# Altium footprint library FootPrintLib_0.PcbLib: 266 footprints (part 11 of 17)
Each footprint in its own frame and in the unit in brackets; x right, y up, seen from the top. Pads: shape width x height; smd on the part's side, far side on the other; paste and mask are expansions set on the pad; w line width, h text height; cw(c..) or ccw(c..) is an arc to the next point about the centre after c.
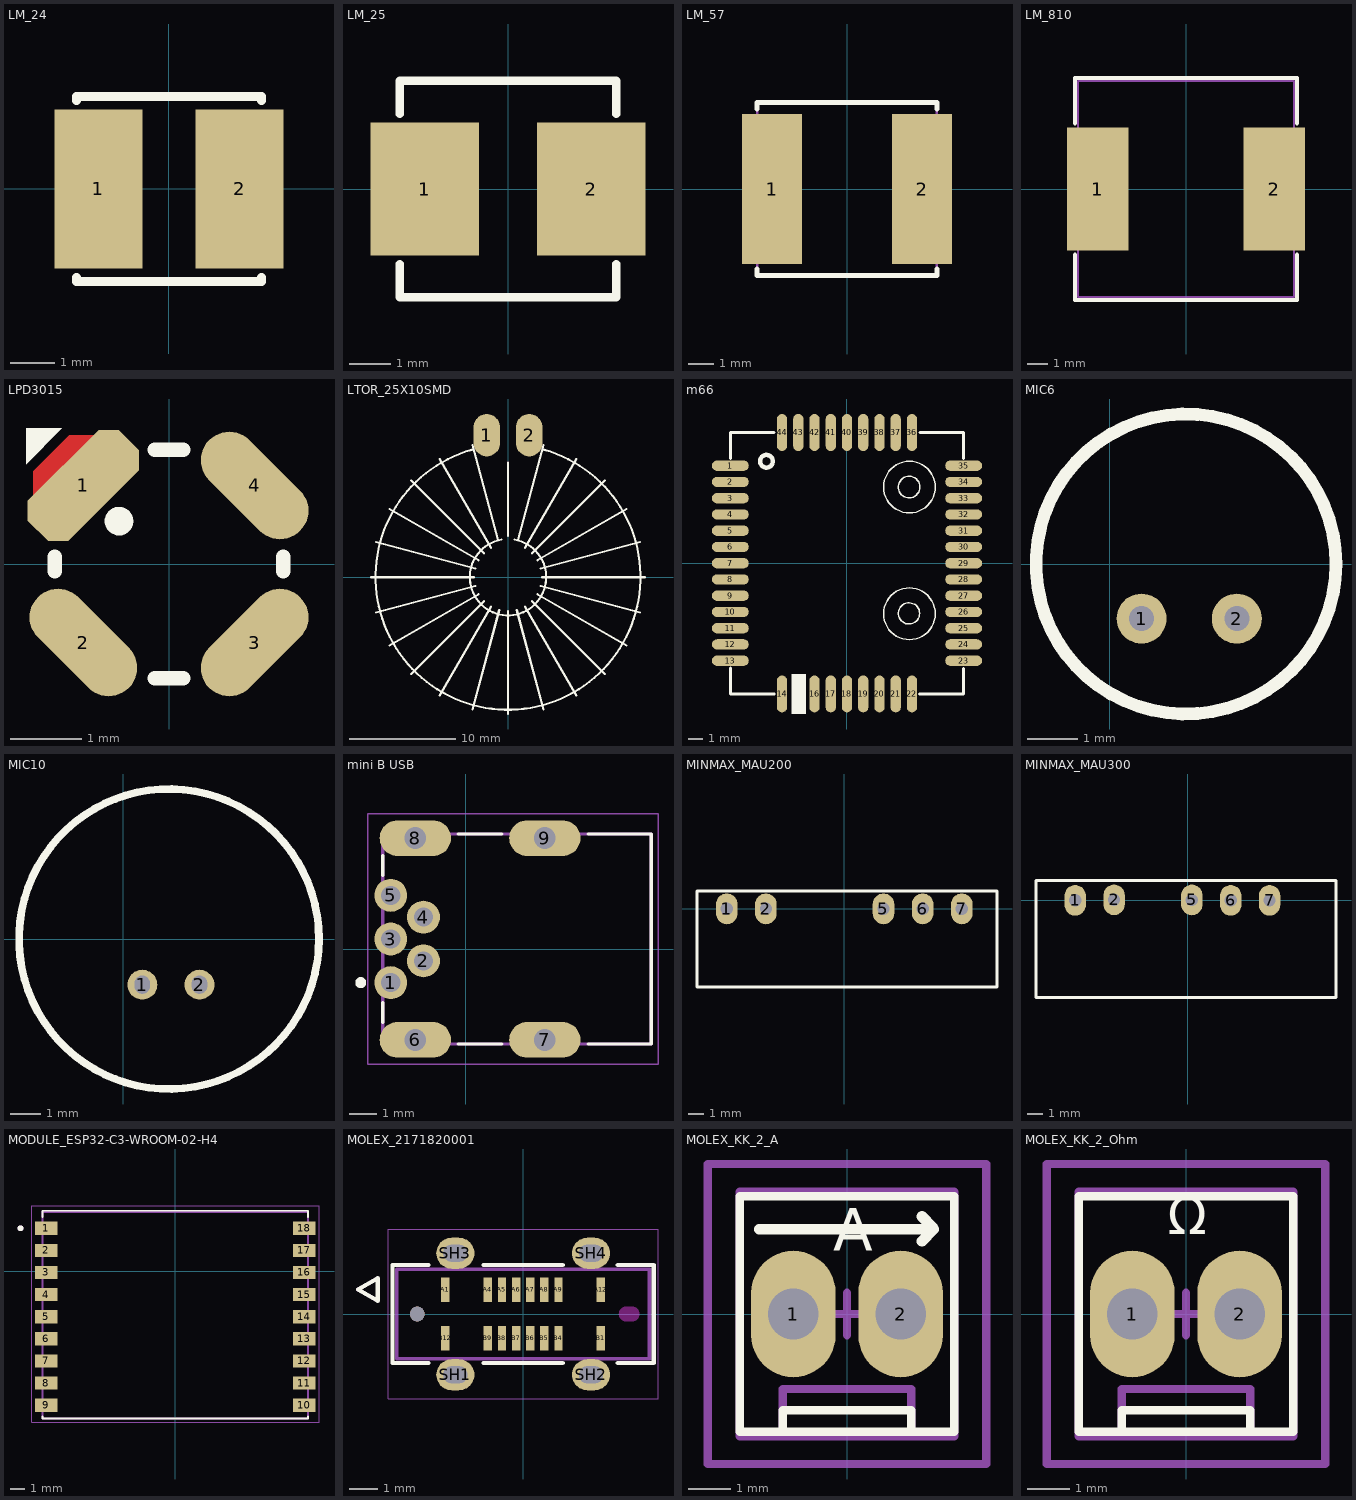
[diagram p10: the footprints below, top view; thin cyan lines are the x and y axes]

## LM_24 [mm] "INDUCTOR, multi size, from 2x2 to 4x4mm"
height 2.5
pads (2):
  rect 2x3.6 smd: 1(-1.6,0) 2(1.6,0)
Top Overlay:
  lines w0.2: -2.1,-2 -2.1,-2.1 2.1,-2.1 2.1,-2 ; -2.1,2 -2.1,2.1 2.1,2.1 2.1,2
3D body: height 3, standoff 0, extent -2,-2 2,2

## LM_25 [mm] "INDUCTOR, multi size, FROM 2X2 TO 5X5mm"
pads (2):
  rect 2.6x3.2 smd: 1(-2,0) 2(2,0)
Top Overlay:
  lines w0.2: -2.6,-1.8 -2.6,-2.6 2.6,-2.6 2.6,-1.8 ; -2.6,1.8 -2.6,2.6 2.6,2.6 2.6,1.8
3D body: height 3, standoff 0, extent -2.5,-2.5 2.5,2.5

## LM_57 [mm] "INDUCTOR, multi size, from 5x5 to 7x7"
height 4.5
pads (2):
  rect 2.4x6 smd: 1(-3,0) 2(3,0)
Top Overlay:
  lines w0.2: -3.6,-3.2 -3.6,-3.45 3.6,-3.45 3.6,-3.2 ; -3.6,3.2 -3.6,3.45 3.6,3.45 3.6,3.2
Mechanical 13:
  lines w0.1: -3.6,-3.45 -3.6,3.45 3.6,3.45 3.6,-3.45 -3.6,-3.45
3D body "User Library-FP3-Cooper.step": height 3, standoff 0, extent -3.625,-3.35 3.625,3.35

## LM_810 [mm] "INDUCTOR, multi size, FROM 8X8 TO 10X10"
height 4
pads (2):
  rect 3x6 smd: 1(-4.3,0) 2(4.3,0)
Top Overlay:
  lines w0.2: -5.4,-3.2 -5.4,-5.4 5.4,-5.4 5.4,-3.2 ; -5.4,3.2 -5.4,5.4 5.4,5.4 5.4,3.2
Mechanical 13:
  lines w0.1: -5.25,-5.25 5.25,-5.25 5.25,5.25 -5.25,5.25 -5.25,-5.25
3D body "User Library-10x10 SMT Power Inductor.step": height 4.8, standoff 0, extent -5.2,-5.2 5.2,5.2

## LPD3015 [mm] "INDUCTOR, coupled, 3X3X1.5mm"
height 1.4
pads (4):
  oct 0.8x1.8 smd rot 135: 1(-1.2,1.1)
  oval 0.8x1.8 smd rot 45: 2(-1.2,-1.1) 4(1.2,1.1)
  oval 0.8x1.8 smd rot 135: 3(1.2,-1.1)
Top Layer:
  region: -0.9,1.8 -1.4,1.8 -1.9,1.3 -1.9,0.8
Top Overlay:
  circle w0.2: c-0.7,0.6 r0.1
  region: -2,1.4 -2,1.9 -1.5,1.9
  lines w0.2: -1.6,-0.1 -1.6,0.1 ; -0.2,-1.6 0.2,-1.6 ; -0.2,1.6 0.2,1.6 ; 1.6,-0.1 1.6,0.1
3D body "Coilcraft-LPD3015.step": height 1.5, standoff 0, extent -1.54,-1.54 1.54,1.54

## LTOR_25X10SMD [mm] "INDUCTOR, TORIOD, 25.0X10.0mm BENDED"
pads (2):
  oval 2.5x4 smd: 1(-2,13.4) 2(2,13.4)
Top Overlay:
  lines w0.2: -12.9,0 -3.2,0 ; -12.46,-3.339 -3.091,-0.828 ; -12.46,3.339 -3.091,0.828 ; -11.172,-6.45 -2.771,-1.6 ; -11.172,6.45 -2.771,1.6 ; -9.122,-9.122 -2.263,-2.263 ; -9.122,9.122 -2.263,2.263 ; -6.45,-11.172 -1.6,-2.771 ; -6.45,11.172 -1.6,2.771 ; -3.408,12.027 ccw(c0,0) 3.408,12.027 ; -3.339,-12.46 -0.828,-3.091 ; -3.339,12.46 -0.942,3.516 ; -0.625,3.545 ccw(c0,0) 0.625,3.545 ; 0,-12.9 0,-3.2 ; 0,3.9 0,10.8 ; 0.828,-3.091 3.339,-12.46 ; 0.942,3.516 3.339,12.46 ; 1.6,-2.771 6.45,-11.172 ; 1.6,2.771 6.45,11.172 ; 2.263,-2.263 9.122,-9.122 ; 2.263,2.263 9.122,9.122 ; 2.771,-1.6 11.172,-6.45 ; 2.771,1.6 11.172,6.45 ; 3.091,-0.828 12.46,-3.339 ; 3.091,0.828 12.46,3.339 ; 3.2,0 12.9,0
3D body "User Library-5701-RC.STEP": height 11.26, standoff -0.06, extent -11.21,-11.235 11.21,23.8

## m66 [mm]
pads (43):
  oval 2.5x0.7 smd: 1(-7.9,6.6) 2(-7.9,5.5) 3(-7.9,4.4) 4(-7.9,3.3) 5(-7.9,2.2) 6(-7.9,1.1) 7(-7.9,0) 8(-7.9,-1.1) 9(-7.9,-2.2) 10(-7.9,-3.3) 11(-7.9,-4.4) 12(-7.9,-5.5) 13(-7.9,-6.6) 23(7.9,-6.6) 24(7.9,-5.5) 25(7.9,-4.4) 26(7.9,-3.3) 27(7.9,-2.2) 28(7.9,-1.1) 29(7.9,0) 30(7.9,1.1) 31(7.9,2.2) 32(7.9,3.3) 33(7.9,4.4) 34(7.9,5.5) 35(7.9,6.6)
  oval 0.7x2.5 smd: 14(-4.4,-8.85) 16(-2.2,-8.85) 17(-1.1,-8.85) 18(0,-8.85) 19(1.1,-8.85) 20(2.2,-8.85) 21(3.3,-8.85) 22(4.4,-8.85) 36(4.4,8.85) 37(3.3,8.85) 38(2.2,8.85) 39(1.1,8.85) 40(0,8.85) 41(-1.1,8.85) 42(-2.2,8.85) 43(-3.3,8.85) 44(-4.4,8.85)
Top Overlay:
  circle w0.3: c-5.45,6.9 r0.43
  circle w0.1: c4.225,5.15 r1.75
  circle w0.1: c4.225,-3.425 r1.75
  circle w0.1: c4.2,5.15 r0.735
  circle w0.1: c4.2,-3.4 r0.716
  rectangle: -3.759,-10.211 -2.769,-7.493
  lines w0.2: -7.9,-7.1 -7.9,-8.85 -4.925,-8.85 ; -7.9,7.075 -7.9,8.85 -4.95,8.85 ; 4.9,-8.85 7.9,-8.85 7.9,-7.125 ; 4.95,8.85 7.9,8.85 7.9,7.1
3D body "step_temp.STEP": height 2.5, standoff 0, extent -7.887,-8.827 7.913,8.873

## MIC6 [mm]
pads (2):
  round 1 hole 0.5: 1(0.635,-1.092) 2(2.54,-1.092)
Top Overlay:
  circle w0.254: c1.524,0 r3
3D body "User Library-6022microphone.step": height 2.26, standoff -2.8, extent -1.428,-3.023 4.572,2.977

## MIC10 [mm]
pads (2):
  round 1 hole 0.508 slot 0.6 at 90 deg: 1(0.635,-1.524) 2(2.54,-1.524)
Top Overlay:
  circle w0.254: c1.524,0 r5
3D body "User Library-Panasonic_WM55A103.step": height 5.43, standoff 0.03, extent -3.35,-4.696 6.35,5.004

## mini B USB [mm]
pads (9):
  round 1.208 hole 0.7: 1(-2.754,-1.219) 2(-1.554,-0.419) 3(-2.754,0.381) 4(-1.554,1.181) 5(-2.754,1.981)
  oval 2.616x1.308 hole 0.8 square: 6(-1.854,-3.319) 7(2.896,-3.319) 8(-1.854,4.081) 9(2.896,4.081)
Top Overlay:
  circle w0.2: c-3.854,-1.219 r0.1
  lines w0.127: -3.054,-2.669 -3.054,-1.959 ; -3.054,2.711 -3.054,3.441 ; -0.284,-3.469 1.326,-3.469 ; -0.284,4.231 1.326,4.231 ; 4.486,-3.469 6.796,-3.469 6.796,4.231 4.486,4.231
Mechanical 13:
  lines w0.127: -3.054,-3.469 -3.054,4.231 6.796,4.231 6.796,-3.469 -3.054,-3.469
Mechanical 15:
  lines w0.05: -3.604,-4.219 -3.604,4.981 7.046,4.981 7.046,-4.219 -3.604,-4.219
3D body "5877.STEP": height 3.95, standoff -1.8, extent -3.124,-3.469 5.876,4.231

## MINMAX_MAU200 [mm] "DC-DC Module, MAU200"
pads (5):
  oval 1.4x2 hole 0.8: 1(-7.62,0) 2(-5.08,0) 5(2.54,0) 6(5.08,0) 7(7.62,0)
Top Overlay:
  lines w0.2: -9.55,-5.055 9.9,-5.055 9.9,1.143 -9.55,1.143 -9.55,-5.055
3D body "User Library-MAU.step": height 9.7, standoff -3.7, extent -9.521,-5.03 9.979,1.17

## MINMAX_MAU300 [mm] "DC-DC Module, MAU200"
pads (5):
  oval 1.4x2 hole 0.8: 1(-7.341,0) 2(-4.797,0.035) 5(0.279,0.025) 6(2.819,0) 7(5.359,0)
Top Overlay:
  lines w0.2: -9.9,1.271 -9.9,-6.35 9.697,-6.35 9.697,1.3 -9.9,1.3
3D body "User Library-MAU302.step": height 9.7, standoff -3.5, extent -9.881,-6.365 9.619,1.235

## MODULE_ESP32-C3-WROOM-02-H4 [mm]
pads (18):
  rect 1.5x0.9 smd: 1(-8.75,2.9) 2(-8.75,1.4) 3(-8.75,-0.1) 4(-8.75,-1.6) 5(-8.75,-3.1) 6(-8.75,-4.6) 7(-8.75,-6.1) 8(-8.75,-7.6) 9(-8.75,-9.1) 10(8.75,-9.1) 11(8.75,-7.6) 12(8.75,-6.1) 13(8.75,-4.6) 14(8.75,-3.1) 15(8.75,-1.6) 16(8.75,-0.1) 17(8.75,1.4) 18(8.75,2.9)
Top Overlay:
  circle w0.2: c-10.5,2.9 r0.1
  lines w0.127: -9,-9.87 -9,-10 9,-10 9,-9.87 ; -9,3.67 -9,4.089 9,4.089 9,3.67
Mechanical 13:
  circle w0.2: c-10.5,2.9 r0.1
  lines w0.127: -9,4 9,4 ; -9,4 -9,-10 9,-10 9,4 ; -9,4 -9,4.039 9,4.039 9,4
Mechanical 15:
  lines w0.05: -9.75,-10.25 9.75,-10.25 9.75,4.42 -9.75,4.42 -9.75,-10.25
3D body "ESP32-C3-WROOM-02U-N4.step": height 3.31, standoff 0.1, extent -8.924,-10.185 9.076,4.115

## MOLEX_2171820001 [mm]
height 6.4
pads (21):
  rect 0.298x0.87 smd mask+0.064: A1(-2.75,0.865) A4(-1.25,0.865) A5(-0.75,0.865) A6(-0.25,0.865) A7(0.25,0.865) A8(0.75,0.865) A9(1.25,0.865) A12(2.75,0.865) B1(2.75,-0.865) B4(1.25,-0.865) B5(0.75,-0.865) B6(0.25,-0.865) B7(-0.25,-0.865) B8(-0.75,-0.865) B9(-1.25,-0.865) B12(-2.75,-0.865)
  oval 1.35x1.1 hole 0.6 slot 0.85 at 0 deg mask+0.064: SH1(-2.4,-2.15) SH2(2.4,-2.15) SH3(-2.4,2.15) SH4(2.4,2.15)
  round 0.52 hole 0.52 unplated mask+0.064: ""(-3.75,0)
Top Overlay:
  lines w0.15: -3.345,-1.73 -4.62,-1.73 -4.62,1.73 -3.345,1.73 ; -1.4,-1.73 1.4,-1.73 ; -1.4,1.73 1.4,1.73 ; 3.345,-1.73 4.62,-1.73 4.62,1.73 3.345,1.73 ; -5.843,0.867 -5.143,1.267 -5.143,0.467 -5.843,0.867
Top Solder:
  circle w0.323: c-3.75,0 r0.162
  region: 3.867,0.323 3.884,0.322 3.901,0.32 3.917,0.316 3.934,0.312 3.95,0.308 3.966,0.302 3.982,0.296 3.997,0.288 4.012,0.28 4.026,0.271 4.04,0.262 4.054,0.251 4.066,0.24 4.079,0.229 4.09,0.216 4.101,0.204 4.112,0.19 4.121,0.176 4.13,0.162 4.138,0.147 4.146,0.132 4.152,0.116 4.158,0.1 4.162,0.084 4.166,0.067 4.17,0.051 4.172,0.034 4.173,0.017 4.173,0 4.173,-0.017 4.172,-0.034 4.17,-0.051 4.166,-0.067 4.162,-0.084 4.158,-0.1 4.152,-0.116 4.146,-0.132 4.138,-0.147 4.13,-0.162 4.121,-0.176 4.112,-0.19 4.101,-0.204 4.09,-0.216 4.079,-0.229 4.066,-0.24 4.054,-0.251 4.04,-0.262 4.026,-0.271 4.012,-0.28 3.997,-0.288 3.982,-0.296 3.966,-0.302 3.95,-0.308 3.934,-0.312 3.917,-0.316 3.901,-0.32 3.884,-0.322 3.867,-0.323 3.85,-0.324 3.65,-0.324 3.633,-0.323 3.616,-0.322 3.599,-0.32 3.583,-0.316 3.566,-0.312 3.55,-0.308 3.534,-0.302 3.518,-0.296 3.503,-0.288 3.488,-0.28 3.474,-0.271 3.46,-0.262 3.446,-0.251 3.434,-0.24 3.421,-0.229 3.41,-0.216 3.399,-0.204 3.388,-0.19 3.379,-0.176 3.37,-0.162 3.362,-0.147 3.354,-0.132 3.348,-0.116 3.342,-0.1 3.338,-0.084 3.334,-0.067 3.33,-0.051 3.328,-0.034 3.327,-0.017 3.326,0 3.327,0.017 3.328,0.034 3.33,0.051 3.334,0.067 3.338,0.084 3.342,0.1 3.348,0.116 3.354,0.132 3.362,0.147 3.37,0.162 3.379,0.176 3.388,0.19 3.399,0.204 3.41,0.216 3.421,0.229 3.434,0.24 3.446,0.251 3.46,0.262 3.474,0.271 3.488,0.28 3.503,0.288 3.518,0.296 3.534,0.302 3.55,0.308 3.566,0.312 3.583,0.316 3.599,0.32 3.616,0.322 3.633,0.323 3.65,0.324 3.65,0.323 3.85,0.324
Bottom Solder:
  region: 3.867,0.323 3.884,0.322 3.901,0.32 3.917,0.316 3.934,0.312 3.95,0.308 3.966,0.302 3.982,0.296 3.997,0.288 4.012,0.28 4.026,0.271 4.04,0.262 4.054,0.251 4.066,0.24 4.079,0.229 4.09,0.216 4.101,0.204 4.112,0.19 4.121,0.176 4.13,0.162 4.138,0.147 4.146,0.132 4.152,0.116 4.158,0.1 4.162,0.084 4.166,0.067 4.17,0.051 4.172,0.034 4.173,0.017 4.173,0 4.173,-0.017 4.172,-0.034 4.17,-0.051 4.166,-0.067 4.162,-0.084 4.158,-0.1 4.152,-0.116 4.146,-0.132 4.138,-0.147 4.13,-0.162 4.121,-0.176 4.112,-0.19 4.101,-0.204 4.09,-0.216 4.079,-0.229 4.066,-0.24 4.054,-0.251 4.04,-0.262 4.026,-0.271 4.012,-0.28 3.997,-0.288 3.982,-0.296 3.966,-0.302 3.95,-0.308 3.934,-0.312 3.917,-0.316 3.901,-0.32 3.884,-0.322 3.867,-0.323 3.85,-0.324 3.65,-0.324 3.633,-0.323 3.616,-0.322 3.599,-0.32 3.583,-0.316 3.566,-0.312 3.55,-0.308 3.534,-0.302 3.518,-0.296 3.503,-0.288 3.488,-0.28 3.474,-0.271 3.46,-0.262 3.446,-0.251 3.434,-0.24 3.421,-0.229 3.41,-0.216 3.399,-0.204 3.388,-0.19 3.379,-0.176 3.37,-0.162 3.362,-0.147 3.354,-0.132 3.348,-0.116 3.342,-0.1 3.338,-0.084 3.334,-0.067 3.33,-0.051 3.328,-0.034 3.327,-0.017 3.326,0 3.327,0.017 3.328,0.034 3.33,0.051 3.334,0.067 3.338,0.084 3.342,0.1 3.348,0.116 3.354,0.132 3.362,0.147 3.37,0.162 3.379,0.176 3.388,0.19 3.399,0.204 3.41,0.216 3.421,0.229 3.434,0.24 3.446,0.251 3.46,0.262 3.474,0.271 3.488,0.28 3.503,0.288 3.518,0.296 3.534,0.302 3.55,0.308 3.566,0.312 3.583,0.316 3.599,0.32 3.616,0.322 3.633,0.323 3.65,0.324 3.65,0.323 3.85,0.324
Keep-Out Layer:
  board cut-out: 3.85,-0.26 3.65,-0.26 3.636,-0.26 3.623,-0.259 3.609,-0.257 3.596,-0.254 3.583,-0.251 3.57,-0.247 3.557,-0.243 3.544,-0.238 3.532,-0.232 3.52,-0.225 3.508,-0.218 3.497,-0.21 3.486,-0.202 3.476,-0.193 3.466,-0.184 3.457,-0.174 3.448,-0.164 3.44,-0.153 3.432,-0.142 3.425,-0.13 3.418,-0.118 3.412,-0.106 3.407,-0.093 3.403,-0.08 3.399,-0.067 3.396,-0.054 3.393,-0.041 3.391,-0.027 3.39,-0.014 3.39,0 3.39,0.014 3.391,0.027 3.393,0.041 3.396,0.054 3.399,0.067 3.403,0.08 3.407,0.093 3.412,0.106 3.418,0.118 3.425,0.13 3.432,0.142 3.44,0.153 3.448,0.164 3.457,0.174 3.466,0.184 3.476,0.193 3.486,0.202 3.497,0.21 3.508,0.218 3.52,0.225 3.532,0.232 3.544,0.238 3.557,0.243 3.57,0.247 3.583,0.251 3.596,0.254 3.609,0.257 3.623,0.259 3.636,0.26 3.65,0.26 3.85,0.26 3.864,0.26 3.877,0.259 3.891,0.257 3.904,0.254 3.917,0.251 3.93,0.247 3.943,0.243 3.956,0.238 3.968,0.232 3.98,0.225 3.992,0.218 4.003,0.21 4.014,0.202 4.024,0.193 4.034,0.184 4.043,0.174 4.052,0.164 4.06,0.153 4.068,0.142 4.075,0.13 4.082,0.118 4.088,0.106 4.093,0.093 4.097,0.08 4.101,0.067 4.104,0.054 4.107,0.041 4.109,0.027 4.11,0.014 4.11,0 4.11,-0.014 4.109,-0.027 4.107,-0.041 4.104,-0.054 4.101,-0.067 4.097,-0.08 4.093,-0.093 4.088,-0.106 4.082,-0.118 4.075,-0.13 4.068,-0.142 4.06,-0.153 4.052,-0.164 4.043,-0.174 4.034,-0.184 4.024,-0.193 4.014,-0.202 4.003,-0.21 3.992,-0.218 3.98,-0.225 3.968,-0.232 3.956,-0.238 3.943,-0.243 3.93,-0.247 3.917,-0.251 3.904,-0.254 3.891,-0.257 3.877,-0.259 3.864,-0.26
Mechanical 2:
  text "'.Designator'" at -0.536,0 h0.7
Mechanical 13:
  lines w0.13: -5.843,0.867 -5.143,1.267 -5.143,0.467 -5.843,0.867 ; -4.47,-1.58 -4.47,1.58 4.47,1.58 4.47,-1.58 -4.47,-1.58
Mechanical 15:
  lines w0.01: -4.77,-3 -4.77,3 4.77,3 4.77,-3 -4.77,-3
3D body "2171820001.stp": height 6.37, standoff -0.97, extent -4.47,-2.3 4.47,2.3

## MOLEX_KK_2_A [mm]
height 11.6
pads (2):
  oval 2x3 hole 1.2: 1(-1.27,0) 2(1.27,0)
Top Overlay:
  lines w0.2: -1.524,-2.794 -1.524,-2.286 1.524,-2.286 1.524,-2.794 ; -2.54,-2.794 -2.54,2.794 2.54,2.794 2.54,-2.794 -2.54,-2.794
  lines w0.254: -2.083,2.007 2.032,2.007 ; 1.778,1.727 2.057,2.007 ; 1.778,2.311 2.032,2.057
  text "A" at -0.33,1.499 h1
Mechanical 13:
  lines w0.2: -1.524,-2.9 -1.524,-1.778 1.524,-1.778 1.524,-2.9 ; -2.54,-2.9 -2.54,2.9 2.54,2.9 2.54,-2.9 -2.54,-2.9
Mechanical 15:
  lines w0.2: -0.508,0 0.508,0 ; 0,-0.508 0,0.508 ; -3.302,-3.556 -3.302,3.556 3.302,3.556 3.302,-1.016 3.302,-3.556 -1.016,-3.556 -3.302,-3.556
3D body "MOLEX KK 022272021.STEP": height 11.7, standoff -3.56, extent -2.54,-2.9 2.54,2.9

## MOLEX_KK_2_Ohm [mm]
height 11.6
pads (2):
  oval 2x3 hole 1.2: 1(-1.27,0) 2(1.27,0)
Top Overlay:
  lines w0.2: -1.524,-2.794 -1.524,-2.286 1.524,-2.286 1.524,-2.794 ; -2.54,-2.794 -2.54,2.794 2.54,2.794 2.54,-2.794 -2.54,-2.794
  text "Ω" at -0.432,1.592 h1.52
Mechanical 13:
  lines w0.2: -1.524,-2.9 -1.524,-1.778 1.524,-1.778 1.524,-2.9 ; -2.54,-2.9 -2.54,2.9 2.54,2.9 2.54,-2.9 -2.54,-2.9
Mechanical 15:
  lines w0.2: -0.508,0 0.508,0 ; 0,-0.508 0,0.508 ; -3.302,-3.556 -3.302,3.556 3.302,3.556 3.302,-1.016 3.302,-3.556 -1.016,-3.556 -3.302,-3.556
3D body "MOLEX KK 022272021.STEP": height 11.7, standoff -3.56, extent -2.54,-2.9 2.54,2.9